# Altium footprint library CH634M-R0-1v1.PcbLib: 17 footprints (part 1 of 2)
Each footprint in its own frame and in the unit in brackets; x right, y up, seen from the top. Pads: shape width x height; smd on the part's side, far side on the other; paste and mask are expansions set on the pad; w line width, h text height; cw(c..) or ccw(c..) is an arc to the next point about the centre after c.
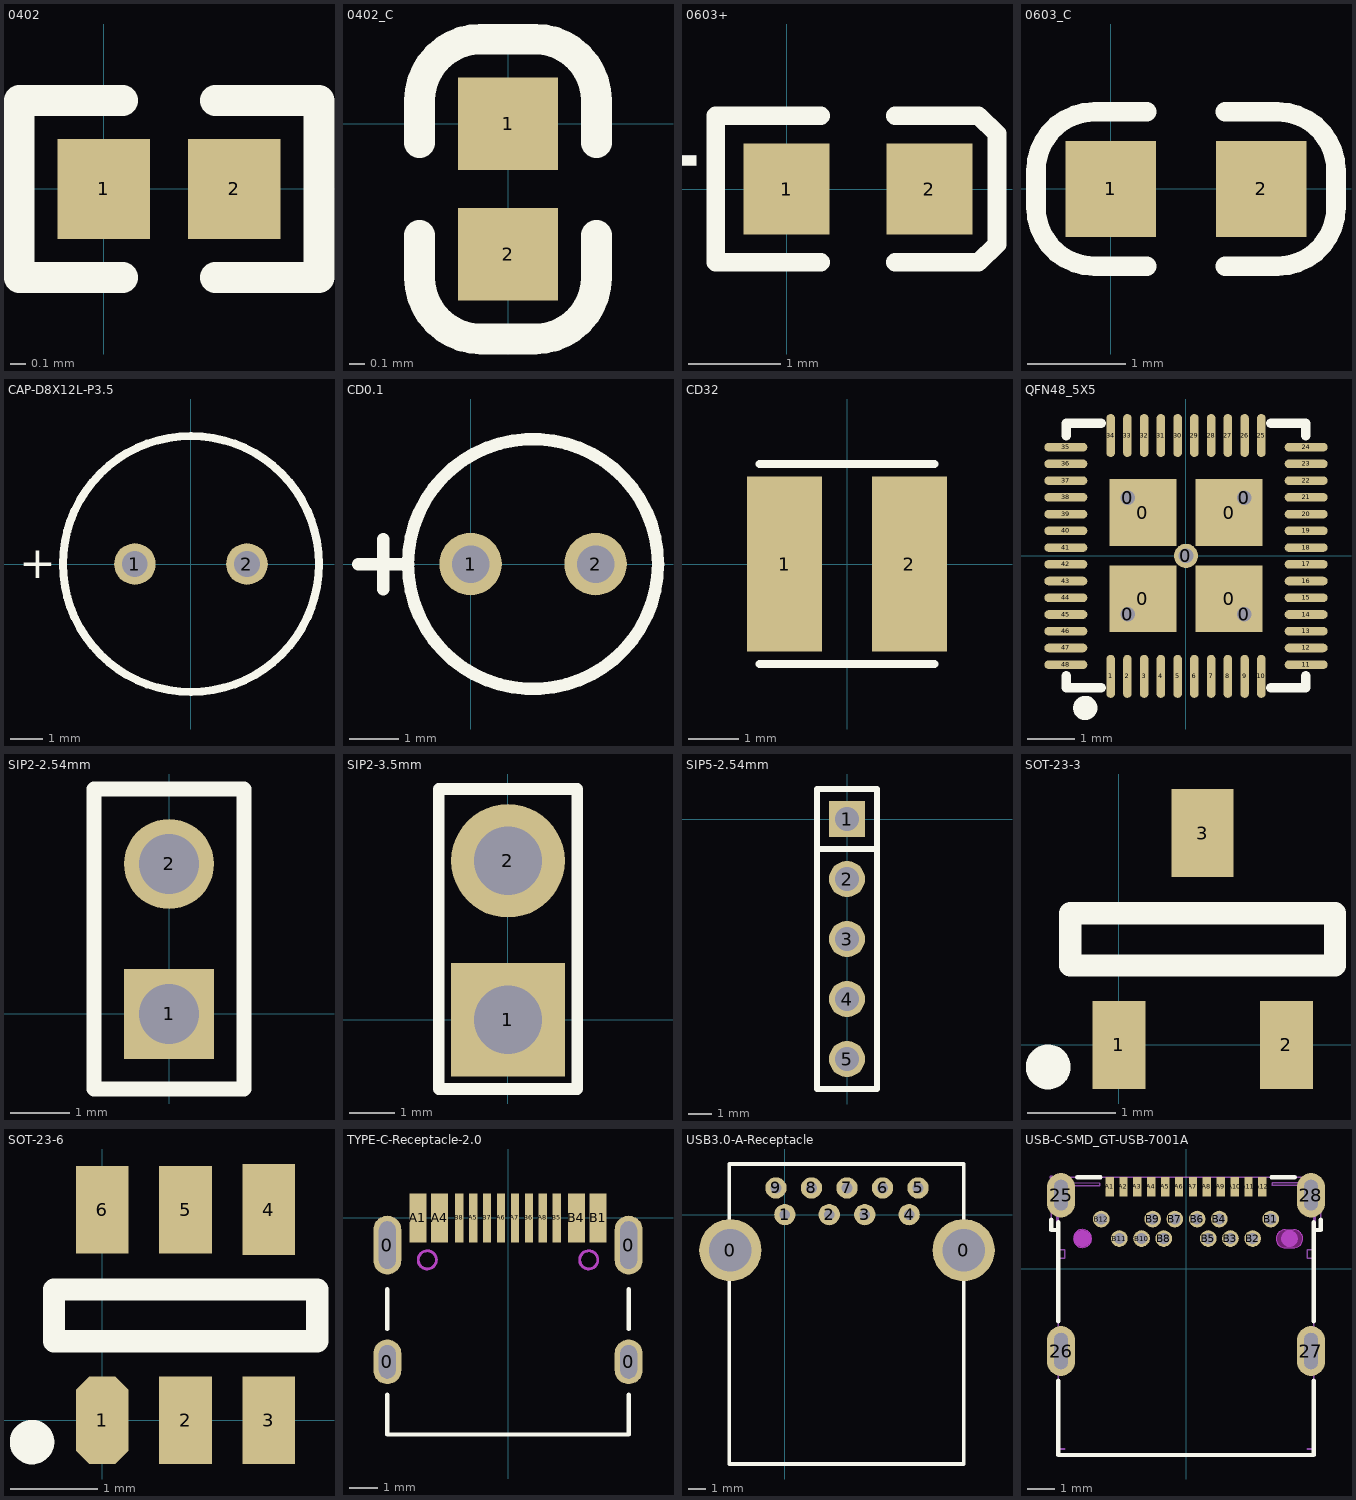
[diagram p0: the footprints below, top view; thin cyan lines are the x and y axes]

## 0402 [mm]
height 1.3
pads (2):
  rect 0.6x0.65 smd mask+0.051: 1(0,0) 2(0.85,0)
Top Overlay:
  lines w0.2: 0.125,-0.575 -0.55,-0.575 -0.55,0.575 0.125,0.575 ; 0.725,-0.575 1.4,-0.575 1.4,0.575 0.725,0.575

## 0402_C [mm]
pads (2):
  rect 0.65x0.6 smd mask+0.051: 1(0,0) 2(0,-0.85)
Top Overlay:
  lines w0.2: -0.575,-0.725 -0.575,-1 ccw(c-0.175,-1) -0.175,-1.4 0.175,-1.4 ccw(c0.175,-1) 0.575,-1 0.575,-0.725 ; -0.575,-0.125 -0.575,0.15 cw(c-0.175,0.15) -0.175,0.55 0.175,0.55 cw(c0.175,0.15) 0.575,0.15 0.575,-0.125

## 0603+ [mm]
height 1.3
pads (2):
  rect 0.93x0.98 smd: 1(0,0) 2(1.54,0)
Top Overlay:
  lines w0.2: 0.37,-0.79 -0.765,-0.79 -0.765,0.79 0.37,0.79 ; 1.17,-0.79 2.07,-0.79 2.27,-0.597 2.27,0.597 2.07,0.79 1.17,0.79
  text "+" at -0.967,-0.279 h1.02

## 0603_C [mm]
pads (2):
  rect 0.93x0.98 smd mask+0.051: 1(0,0) 2(1.54,0)
Top Overlay:
  lines w0.2: 0.37,-0.79 -0.165,-0.79 cw(c-0.165,-0.19) -0.765,-0.19 -0.765,0.19 cw(c-0.165,0.19) -0.165,0.79 0.37,0.79 ; 1.17,-0.79 1.705,-0.79 ccw(c1.705,-0.19) 2.305,-0.19 2.305,0.19 ccw(c1.705,0.19) 1.705,0.79 1.17,0.79

## CAP-D8X12L-P3.5 [mm]
pads (2):
  round 1.3 hole 0.8 mask+0.051: 1(-1.75,0) 2(1.75,0)
Top Overlay:
  circle w0.254: c0,0 r4
  text "+" at -5.372,-0.449 h1

## CD0.1 [mil]
pads (2):
  round 50 hole 30: 1(0,0) 2(100,0)
Top Overlay:
  circle w10: c50,0 r100
  lines w10: -90,0 -50,0 ; -70,-20 -70,20

## CD32 [mm]
height 1.3
pads (2):
  rect 1.5x3.5 smd: 1(-1.25,0) 2(1.25,0)
Top Overlay:
  lines w0.152: -1.75,-2 1.75,-2 ; -1.75,2 1.75,2

## QFN48_5X5 [mm]
pads (57):
  round 0.508 hole 0.305 mask+0.102: 0(-1.219,-1.219) 0(-1.219,1.219) 0(0,0) 0(1.219,-1.219) 0(1.219,1.219)
  rect 1.397x1.397 smd mask+0: 0(-0.901,-0.895) 0(-0.901,0.908) 0(0.902,-0.895) 0(0.902,0.908)
  oval 0.18x0.9 smd mask+0.051: 1(-1.575,-2.519) 2(-1.225,-2.519) 3(-0.875,-2.519) 4(-0.525,-2.519) 5(-0.175,-2.519) 6(0.175,-2.519) 7(0.525,-2.519) 8(0.875,-2.519) 9(1.225,-2.519) 10(1.575,-2.519) 25(1.575,2.519) 26(1.225,2.519) 27(0.875,2.519) 28(0.525,2.519) 29(0.175,2.519) 30(-0.175,2.519) 31(-0.525,2.519) 32(-0.875,2.519) 33(-1.225,2.519) 34(-1.575,2.519)
  oval 0.9x0.18 smd mask+0.051: 11(2.514,-2.275) 12(2.514,-1.925) 13(2.514,-1.575) 14(2.514,-1.225) 15(2.514,-0.875) 16(2.514,-0.525) 17(2.514,-0.175) 18(2.514,0.175) 19(2.514,0.525) 20(2.514,0.875) 21(2.514,1.225) 22(2.514,1.575) 23(2.514,1.925) 24(2.514,2.275) 35(-2.514,2.275) 36(-2.514,1.925) 37(-2.514,1.575) 38(-2.514,1.225) 39(-2.514,0.875) 40(-2.514,0.525) 41(-2.514,0.175) 42(-2.514,-0.175) 43(-2.514,-0.525) 44(-2.514,-0.875) 45(-2.514,-1.225) 46(-2.514,-1.575) 47(-2.514,-1.925) 48(-2.514,-2.275)
Top Overlay:
  circle w0.254: c-2.108,-3.179 r0.127
  lines w0.2: -2.509,-2.506 -2.509,-2.76 -1.778,-2.76 ; -2.509,2.519 -2.509,2.772 -1.778,2.772 ; 1.778,-2.76 2.509,-2.76 2.509,-2.506 ; 1.778,2.772 2.509,2.772 2.509,2.519

## SIP2-2.54mm [mil]
height 381.89
pads (2):
  rect 60x60 hole 40: 1(0,0)
  round 60 hole 40: 2(0,100)
Top Overlay:
  lines w10: -50,-50 -50,150 50,150 50,-50 -50,-50

## SIP2-3.5mm [mm]
height 9.7
pads (2):
  rect 2.5x2.5 hole 1.5: 1(0,0)
  round 2.5 hole 1.5: 2(0,3.5)
Top Overlay:
  lines w0.254: -1.524,-1.524 -1.524,5.08 1.524,5.08 1.524,-1.524 -1.524,-1.524

## SIP5-2.54mm [mil]
height 51.18
pads (5):
  rect 60x60 hole 40: 1(0,0)
  round 60 hole 40: 2(0,-100) 3(0,-200) 4(0,-300) 5(0,-400)
Top Overlay:
  lines w10: -50,-50 50,-50 ; -50,-450 50,-450 50,50 -50,50 -50,-450

## SOT-23-3 [mm] "SOT-23-3"
pads (3):
  rect 0.6x1 smd: 1(0,0) 2(1.9,0)
  rect 0.7x1 smd: 3(0.95,2.4)
Top Overlay:
  circle w0.254: c-0.8,-0.25 r0.127
  lines w0.254: -0.55,0.9 2.45,0.9 2.45,1.49 -0.55,1.49 -0.55,0.9

## SOT-23-6 [mm] "SOT-23-6"
height 1.3
pads (6):
  oct 0.6x1 smd: 1(0,0)
  rect 0.6x1 smd: 2(0.95,0) 3(1.9,0) 5(0.95,2.4) 6(0,2.4)
  rect 0.6x1.04 smd: 4(1.9,2.4)
Top Overlay:
  circle w0.254: c-0.8,-0.25 r0.127
  lines w0.254: -0.55,0.9 2.45,0.9 2.45,1.49 -0.55,1.49 -0.55,0.9

## TYPE-C-Receptacle-2.0 [mm]
height 1.3
pads (16):
  oval 1x1.6 hole 0.6 slot 1.2 at 90 deg: 0(-4.32,-5.15) 0(4.32,-5.15)
  oval 1x2.1 hole 0.6 slot 1.7 at 90 deg: 0(-4.32,-0.97) 0(4.32,-0.97)
  rect 0.6x1.75 smd mask+0.051: A1(-3.225,0) A4(-2.45,0) B1(3.225,0) B4(2.45,0)
  rect 0.3x1.75 smd mask+0.051: A5(-1.25,0) A6(-0.25,0) A7(0.25,0) A8(1.25,0) B5(1.75,0) B6(0.75,0) B7(-0.75,0) B8(-1.75,0)
Top Overlay:
  lines w0.152: -4.32,-6.325 -4.32,-7.75 4.32,-7.75 4.32,-6.325 ; -4.32,-3.975 -4.32,-2.55 ; 4.32,-3.975 4.32,-2.55
Keep-Out Layer:
  circle w0.1: c-2.89,-1.5 r0.325
  circle w0.1: c2.89,-1.5 r0.325
Mechanical 1:
  circle w0.102: c-2.89,-1.5 r0.325
  circle w0.102: c2.89,-1.5 r0.325

## USB3.0-A-Receptacle [mm]
height 1.3
pads (11):
  round 3.5 hole 2.4: 0(-3.07,-2) 0(10.07,-2)
  round 1.2 hole 0.6: 1(0,0) 2(2.5,0) 3(4.5,0) 4(7,0) 5(7.5,1.5) 6(5.5,1.5) 7(3.5,1.5) 8(1.5,1.5) 9(-0.5,1.5)
Top Overlay:
  lines w0.2: -3.138,2.85 -3.138,-14.041 10.07,-14.041 10.07,2.85 -3.13,2.85 ; -1.33,2.85 1.245,2.85
Bottom Overlay:
  text "T+" at -0.127,-1.041 h0.8
  text "T-" at 1.803,-1.041 h0.8
  text "G" at 3.886,-1.041 h0.8
  text "R+" at 5.969,-1.041 h0.8
  text "R-" at 7.772,-1.041 h0.8
  text "G" at 7.315,-3.302 h0.8
  text "D+" at 4.775,-3.302 h0.8
  text "D-" at 2.743,-3.302 h0.8
  text "V" at 0.406,-3.302 h0.8

## USB-C-SMD_GT-USB-7001A [mm]
pads (28):
  oval 1x1.6 hole 0.5 slot 1.1 at 90 deg paste+0.051: 25(-4.5,2.655) 28(4.5,2.655)
  oval 1x1.8 hole 0.5 slot 1.3 at 90 deg paste+0.051: 26(-4.5,-2.955) 27(4.5,-2.955)
  rect 0.3x0.7 smd paste-100 mask+0.051: A1(-2.75,2.955) A2(-2.25,2.955) A3(-1.75,2.955) A4(-1.25,2.955) A5(-0.75,2.955) A6(-0.25,2.955) A7(0.25,2.955) A8(0.75,2.955) A9(1.25,2.955) A10(1.75,2.955) A11(2.25,2.955) A12(2.75,2.955)
  round 0.6 hole 0.4 paste+0.051: B1(3.05,1.795) B2(2.4,1.095) B4(1.2,1.795) B5(0.8,1.095) B6(0.4,1.795) B7(-0.4,1.795) B9(-1.2,1.795) B10(-1.6,1.095) B12(-3.05,1.795)
  round 0.6 hole 0.4 copper offset 0,0 paste+0.051: B3(1.6,1.095) B8(-0.8,1.095) B11(-2.4,1.095)
Top Overlay:
  lines w0.152: -4.85,1.772 -4.85,1.4 -4.68,1.4 ; -4.6,-4.028 -4.6,-6.7 4.6,-6.7 4.6,-4.028 ; -4.6,-1.882 -4.6,1.682 ; -3.914,3.3 -3.08,3.3 ; 3.08,3.3 3.914,3.3 ; 4.6,-1.882 4.6,1.682 ; 4.68,1.4 4.85,1.4 4.85,1.772
Top Paste:
  drawing of 28 lines, arcs and shapes, not listed
Keep-Out Layer:
  circle w0.003: c-3.725,1.095 r0.325
  region: 3.57,1.41 3.885,1.419 4.003,1.395 4.111,1.323 4.183,1.215 4.208,1.087 4.183,0.959 4.111,0.851 4.003,0.779 3.875,0.753 3.865,0.756 3.865,0.76 3.57,0.755 3.448,0.779 3.341,0.851 3.269,0.958 3.244,1.085 3.269,1.212 3.341,1.319 3.448,1.391 3.57,1.415
  region: 3.57,1.41 3.885,1.419 4.003,1.395 4.111,1.323 4.183,1.215 4.208,1.087 4.183,0.959 4.111,0.851 4.003,0.779 3.875,0.753 3.865,0.756 3.865,0.76 3.57,0.755 3.448,0.779 3.341,0.851 3.269,0.958 3.244,1.085 3.269,1.212 3.341,1.319 3.448,1.391 3.57,1.415
  region: -3.394,1.095 -3.419,0.968 -3.491,0.861 -3.598,0.789 -3.725,0.764 -3.852,0.789 -3.959,0.861 -4.031,0.968 -4.056,1.095 -4.031,1.222 -3.959,1.329 -3.852,1.401 -3.725,1.426 -3.598,1.401 -3.491,1.329 -3.419,1.222
  region: -3.394,1.095 -3.419,0.968 -3.491,0.861 -3.598,0.789 -3.725,0.764 -3.852,0.789 -3.959,0.861 -4.031,0.968 -4.056,1.095 -4.031,1.222 -3.959,1.329 -3.852,1.401 -3.725,1.426 -3.598,1.401 -3.491,1.329 -3.419,1.222
  lines w0.003: 3.57,0.76 cw(c3.575,1.085) 3.57,1.41 3.885,1.414 cw(c3.875,1.087) 3.865,0.76 3.57,0.76
Mechanical 1:
  circle w0.003: c-3.725,1.095 r0.325
  lines w0.003: 3.57,0.76 cw(c3.575,1.085) 3.57,1.41 3.885,1.414 cw(c3.875,1.087) 3.865,0.76 3.57,0.76
Mechanical 2:
  circle w0.3: c3.725,1.091 r0.15
  circle w0.3: c-3.725,1.095 r0.15
Mechanical 6:
  lines w0.051: 4.38,-6.5 4.37,-6.49 4.37,-6.47 4.6,-6.47 4.6,0.38 4.6,0.39 4.37,0.39 4.37,0.69 4.6,0.69 4.6,3 4.61,3.01 3.11,3.01 3.1,3 3.1,3.1 4.55,3.1 4.58,3.09 4.62,3.07 4.64,3.05 4.65,3.02 4.65,1.4 4.85,1.4 4.85,3 4.84,3.07 4.81,3.15 4.76,3.21 4.7,3.25 4.63,3.28 4.55,3.3 -4.55,3.3 -4.63,3.28 -4.7,3.25 -4.76,3.21 -4.81,3.15 -4.84,3.07 -4.85,3 -4.85,1.4 -4.66,1.4 -4.65,1.4 -4.65,3.02 -4.64,3.05 -4.62,3.07 -4.59,3.09 -4.55,3.1 -3.1,3.09 -3.1,3 -4.6,3 -4.6,0.69 -4.37,0.69 -4.37,0.39 -4.6,0.39 -4.6,-6.47 -4.4,-6.47 -4.37,-6.48 -4.37,-6.49 -4.39,-6.5 -4.6,-6.5 -4.6,-6.7 4.6,-6.7 4.6,-6.5 4.4,-6.5 4.38,-6.5 ; 4.38,-6.5 4.38,-6.5
Mechanical 8:
  region: -4.785,3.3 -4.804,3.254 -4.85,3.235 -4.896,3.254 -4.915,3.3 -4.896,3.346 -4.85,3.365 -4.804,3.346
Mechanical 9:
  region: -0.875,3.155 -0.625,3.155 -0.625,2.755 -0.875,2.755
  region: -1.375,3.155 -1.125,3.155 -1.125,2.755 -1.375,2.755
  region: -1.875,3.155 -1.625,3.155 -1.625,2.755 -1.875,2.755
  region: -2.375,3.155 -2.125,3.155 -2.125,2.755 -2.375,2.755
  region: -2.875,3.155 -2.625,3.155 -2.625,2.755 -2.875,2.755
  region: -0.375,3.155 -0.125,3.155 -0.125,2.755 -0.375,2.755
  region: 0.125,3.155 0.375,3.155 0.375,2.755 0.125,2.755
  region: 0.625,3.155 0.875,3.155 0.875,2.755 0.625,2.755
  region: 1.125,3.155 1.375,3.155 1.375,2.755 1.125,2.755
  region: 1.625,3.155 1.875,3.155 1.875,2.755 1.625,2.755
  region: 2.125,3.155 2.375,3.155 2.375,2.755 2.125,2.755
  region: 2.625,3.155 2.875,3.155 2.875,2.755 2.625,2.755
  region: -3.19,1.855 -2.91,1.855 -2.91,1.735 -3.19,1.735
  region: -2.54,1.155 -2.26,1.155 -2.26,1.035 -2.54,1.035
  region: -1.74,1.155 -1.46,1.155 -1.46,1.035 -1.74,1.035
  region: -1.34,1.855 -1.06,1.855 -1.06,1.735 -1.34,1.735
  region: -0.94,1.155 -0.66,1.155 -0.66,1.035 -0.94,1.035
  region: -0.54,1.855 -0.26,1.855 -0.26,1.735 -0.54,1.735
  region: 0.26,1.855 0.54,1.855 0.54,1.735 0.26,1.735
  region: 0.66,1.155 0.94,1.155 0.94,1.035 0.66,1.035
  region: 1.06,1.855 1.34,1.855 1.34,1.735 1.06,1.735
  region: 1.46,1.155 1.74,1.155 1.74,1.035 1.46,1.035
  region: 2.26,1.155 2.54,1.155 2.54,1.035 2.26,1.035
  region: 2.91,1.855 3.19,1.855 3.19,1.735 2.91,1.735
  region: -4.6,3.05 -4.4,3.05 -4.4,2.26 -4.6,2.26
  region: 4.4,3.05 4.6,3.05 4.6,2.26 4.4,2.26
  region: -4.6,-2.455 -4.4,-2.455 -4.4,-3.455 -4.6,-3.455
  region: 4.4,-2.455 4.6,-2.455 4.6,-3.455 4.4,-3.455